# Altium integrated library Integrated_Library1.IntLib: 1 symbol
Pins are listed as number, name and electrical type; pins without a type are passive.

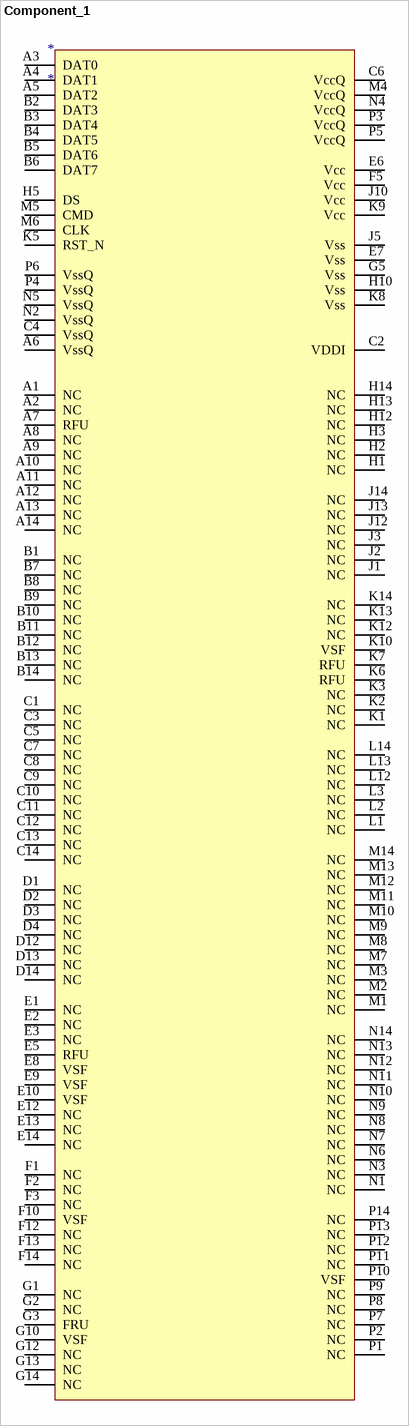
[diagram p0: symbol Component_1]

## Component_1
designator *
footprint FSEIASLD-32G
pins: A1 NC, A2 NC, A3 DAT0, A4 DAT1, A5 DAT2, A6 VssQ, A7 RFU, A8 NC, A9 NC, A10 NC, A11 NC, A12 NC, A13 NC, A14 NC, B1 NC, B2 DAT3, B3 DAT4, B4 DAT5, B5 DAT6, B6 DAT7, B7 NC, B8 NC, B9 NC, B10 NC, B11 NC, B12 NC, B13 NC, B14 NC, C1 NC, C2 VDDI, C3 NC, C4 VssQ, C5 NC, C6 VccQ, C7 NC, C8 NC, C9 NC, C10 NC, C11 NC, C12 NC, C13 NC, C14 NC, D1 NC, D2 NC, D3 NC, D4 NC, D12 NC, D13 NC, D14 NC, E1 NC, E2 NC, E3 NC, E5 RFU, E6 Vcc, E7 Vss, E8 VSF, E9 VSF, E10 VSF, E12 NC, E13 NC, E14 NC, F1 NC, F2 NC, F3 NC, F5 Vcc, F10 VSF, F12 NC, F13 NC, F14 NC, G1 NC, G2 NC, G3 FRU, G5 Vss, G10 VSF, G12 NC, G13 NC, G14 NC, H1 NC, H2 NC, H3 NC, H5 DS, H10 Vss, H12 NC, H13 NC, H14 NC, J1 NC, J2 NC, J3 NC, J5 Vss, J10 Vcc, J12 NC, J13 NC, J14 NC, K1 NC, K2 NC, K3 NC, K5 RST_N, K6 RFU, K7 RFU, K8 Vss, K9 Vcc, K10 VSF, K12 NC, K13 NC, K14 NC, L1 NC, L2 NC, L3 NC, L12 NC, L13 NC, L14 NC, M1 NC, M2 NC, M3 NC, M4 VccQ, M5 CMD, M6 CLK, M7 NC, M8 NC, M9 NC, M10 NC, M11 NC, M12 NC, M13 NC, M14 NC, N1 NC, N2 VssQ, N3 NC, N4 VccQ, N5 VssQ, N6 NC, N7 NC, N8 NC, N9 NC, N10 NC, N11 NC, N12 NC, N13 NC, N14 NC, P1 NC, P2 NC, P3 VccQ, P4 VssQ, P5 VccQ, P6 VssQ, P7 NC, P8 NC, P9 NC, P10 VSF, P11 NC, P12 NC, P13 NC, P14 NC